# Altium footprint library fuses.PcbLib: 1 footprints
Each footprint in its own frame and in the unit in brackets; x right, y up, seen from the top. Pads: shape width x height; smd on the part's side, far side on the other; paste and mask are expansions set on the pad; w line width, h text height; cw(c..) or ccw(c..) is an arc to the next point about the centre after c.
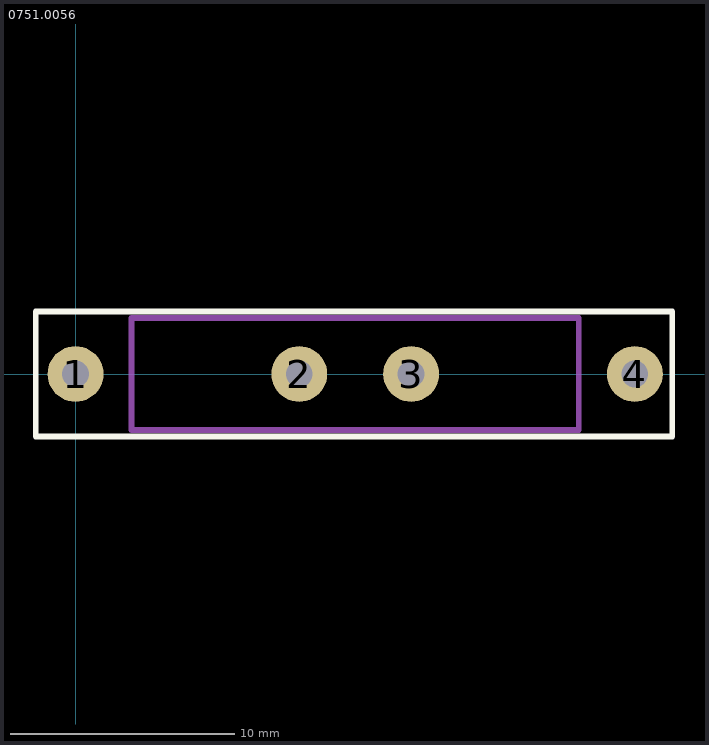
[diagram p0: the footprint, top view; thin cyan lines are the x and y axes]

## 0751.0056 [mm] "Fuse clips; cylindrical fuses; THT; 5x20mm,6.3x32mm; 16A; bronze"
height 12
pads (4):
  round 2.5 hole 1.2: 1(0,0) 2(10,0) 3(15,0) 4(25,0)
Top Overlay:
  lines w0.254: -1.778,-2.794 -1.778,2.794 26.67,2.794 26.67,-2.794 -1.778,-2.794
  text ".DESIGNATOR" at -1.27,3.302 h1
Mechanical 13:
  lines w0.254: 2.5,-2.5 22.5,-2.5 22.5,2.5 2.5,2.5 2.5,-2.5